# EAGLE library part ARDUINO-NANO (library moto-edge-hil)
ARDUINO-NANO Arduino Nano (elde var) - HIL ariza/besleme dugumu alternatifi. Satirlar 15.24 mm. Kart: 18.0 x 45.0 mm - Guven: H STEP: arduino.cc Nano STEP
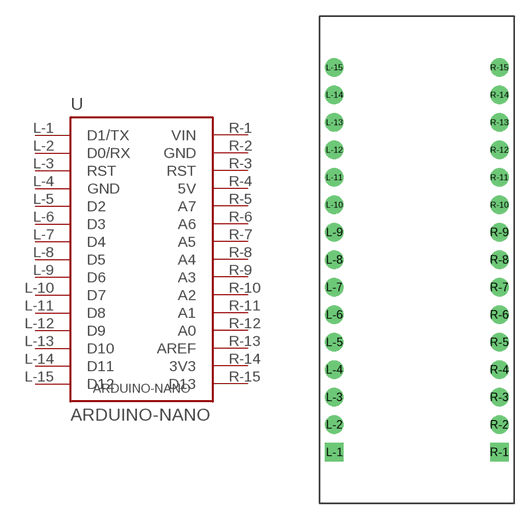
[diagram p4: symbol with the pads of ARDUINO-NANO; footprint ARDUINO-NANO]

Designator prefix U

## ARDUINO-NANO (BOARD_SIZE: 18.0x45.0mm; CONFIDENCE: H)  [ARDUINO-NANO]
L-1  D1/TX  pas
L-2  D0/RX  pas
L-3  RST  pas
L-4  GND  pas
L-5  D2  pas
L-6  D3  pas
L-7  D4  pas
L-8  D5  pas
L-9  D6  pas
L-10  D7  pas
L-11  D8  pas
L-12  D9  pas
L-13  D10  pas
L-14  D11  pas
L-15  D12  pas
R-1  VIN  pas
R-2  GND  pas
R-3  RST  pas
R-4  5V  pas
R-5  A7  pas
R-6  A6  pas
R-7  A5  pas
R-8  A4  pas
R-9  A3  pas
R-10  A2  pas
R-11  A1  pas
R-12  A0  pas
R-13  AREF  pas
R-14  3V3  pas
R-15  D13  pas

## Footprint ARDUINO-NANO (pad centres in mm)
Arduino Nano (elde var) - HIL ariza/besleme dugumu alternatifi. Satirlar 15.24 mm. | Kart: 18.0 x 45.0 mm | Guven: H
drill 1 pad 1.7 square: L-1 -7.62,-17.78; R-1 7.62,-17.78
drill 1 pad 1.7 round: L-2 -7.62,-15.24; L-3 -7.62,-12.7; L-4 -7.62,-10.16; L-5 -7.62,-7.62; L-6 -7.62,-5.08; L-7 -7.62,-2.54; L-8 -7.62,0; L-9 -7.62,2.54; L-10 -7.62,5.08; L-11 -7.62,7.62; L-12 -7.62,10.16; L-13 -7.62,12.7; L-14 -7.62,15.24; L-15 -7.62,17.78; R-2 7.62,-15.24; R-3 7.62,-12.7; R-4 7.62,-10.16; R-5 7.62,-7.62; R-6 7.62,-5.08; R-7 7.62,-2.54; R-8 7.62,0; R-9 7.62,2.54; R-10 7.62,5.08; R-11 7.62,7.62; R-12 7.62,10.16; R-13 7.62,12.7; R-14 7.62,15.24; R-15 7.62,17.78